# Altium footprint library Hydrolib_pcb.PcbLib: 62 footprints (part 4 of 4)
Each footprint in its own frame and in the unit in brackets; x right, y up, seen from the top. Pads: shape width x height; smd on the part's side, far side on the other; paste and mask are expansions set on the pad; w line width, h text height; cw(c..) or ccw(c..) is an arc to the next point about the centre after c.
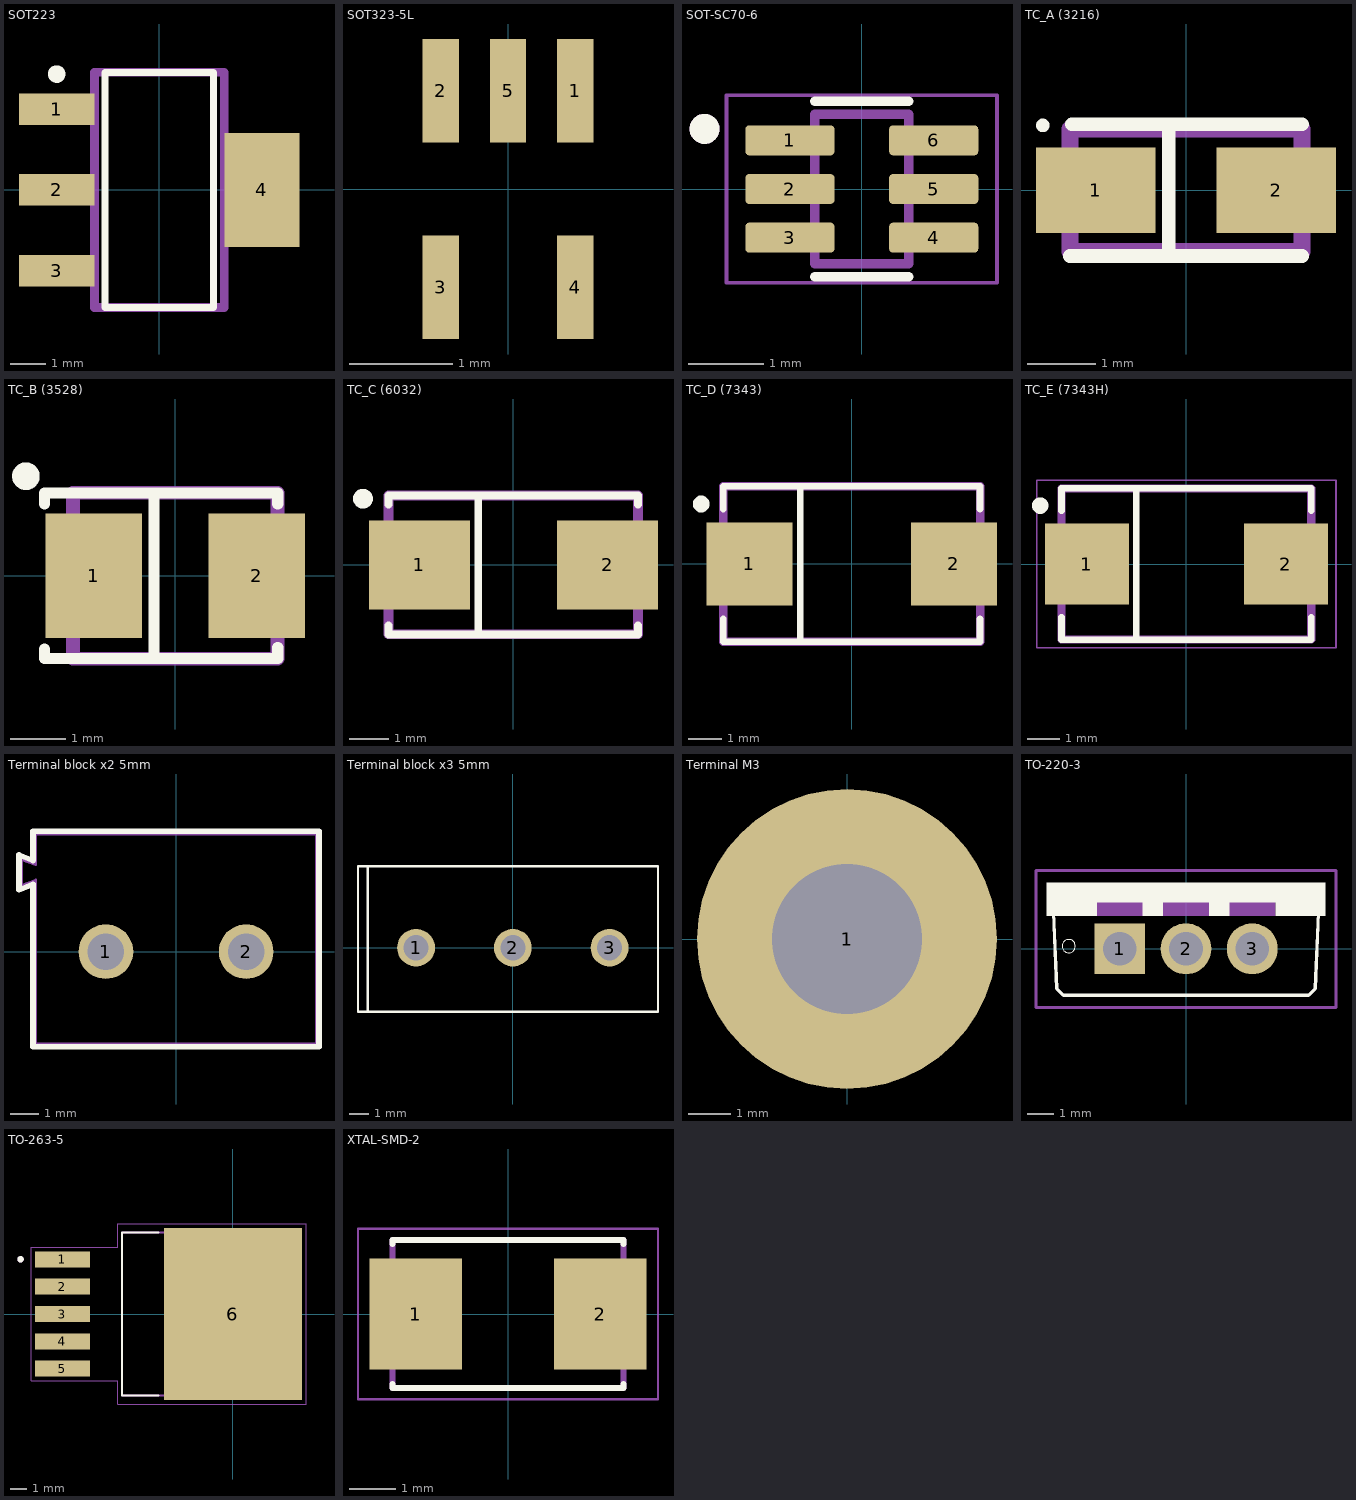
[diagram p3: the footprints below, top view; thin cyan lines are the x and y axes]

## SOT223 [mm] "SOT223, ld1117"
height 1.8
pads (4):
  rect 2.15x0.9 smd: 1(-2.925,2.3) 2(-2.925,0) 3(-2.925,-2.3)
  rect 2.15x3.25 smd: 4(2.925,0)
Top Overlay:
  circle w0.25: c-2.925,3.3 r0.125
  lines w0.2: -1.55,-3.35 -1.55,3.35 1.55,3.35 1.55,-3.35 -1.55,-3.35
Mechanical 4:
  lines w0.25: -1.85,-3.35 -1.85,3.35 1.85,3.35 1.85,-3.35 -1.85,-3.35
  text ".Designator" at 0.7,-2.9 h2.15
3D body "SOT223-3.step": height 1.6, standoff 0, extent -3.562,-3.3 3.512,3.2

## SOT323-5L [mm]
pads (5):
  rect 0.35x1 smd: 1(0.65,0.953) 2(-0.65,0.953) 3(-0.65,-0.947) 4(0.65,-0.947) 5(0,0.953)
3D body "ESDALC6V1W5.STEP": height 1.1, standoff 0, extent -1,-0.95 1,1.15

## SOT-SC70-6 [mm]
pads (6):
  rrect25% 1.19x0.4 smd: 1(-0.96,0.65) 2(-0.96,0) 3(-0.96,-0.65) 4(0.96,-0.65) 5(0.96,0) 6(0.96,0.65)
Top Overlay:
  circle w0.2: c-2.1,0.802 r0.1
  lines w0.127: -0.625,-1.17 0.625,-1.17 ; -0.625,1.17 0.625,1.17
Mechanical 13:
  circle w0.2: c-2.1,0.802 r0.1
  lines w0.127: -0.625,-1 0.625,-1 0.625,1 -0.625,1 -0.625,-1
Mechanical 15:
  lines w0.05: -1.805,-1.25 1.805,-1.25 1.805,1.25 -1.805,1.25 -1.805,-1.25
3D body "step_temp.STEP": height 1.1, standoff 0, extent -1.05,-1 1.05,1

## TC_A (3216) [mm] "Tantalum capacitor, type A,  1 pin - plus"
height 1.8
pads (2):
  rect 1.75x1.25 smd: 1(-1.325,0) 2(1.325,0)
Top Overlay:
  circle w0.1: c-2.1,0.95 r0.05
  lines w0.2: -1.702,-0.965 -0.254,-0.965 ; -1.676,0.965 -0.254,0.965 ; 1.702,-0.965 -0.254,-0.965 ; 1.702,0.965 -0.254,0.965 ; -0.254,-0.965 -0.254,0.965
Mechanical 4:
  lines w0.25: -1.7,-0.9 1.7,-0.9 1.7,0.9 -1.7,0.9 -1.7,-0.9
  text ".Designator" at 3.7,5.303 h2.15
3D body "Tant Cap SMD size A _ 3216-18.stp": height 1.64, standoff 0.01, extent -1.73,-0.8 1.73,0.8

## TC_B (3528) [mm] "Tantalum capacitor, type B, 1 pin - plus"
height 2.1
pads (2):
  rect 1.75x2.25 smd: 1(-1.475,0) 2(1.475,0)
Top Overlay:
  circle w0.25: c-2.7,1.8 r0.125
  lines w0.2: -2.362,-1.321 -2.362,-1.499 -2.361,-1.5 -0.381,-1.5 1.854,-1.5 1.854,-1.295 ; -2.361,1.295 -2.361,1.5 -0.381,1.5 ; -0.381,-1.499 -0.381,1.5 ; 1.854,1.295 1.854,1.5 -0.381,1.5
Mechanical 4:
  lines w0.25: -1.85,-1.5 1.85,-1.5 1.85,1.5 -1.85,1.5 -1.85,-1.5
  text ".Designator" at 3.4,6.203 h2.15
3D body "CAPM-TANTB-BK.stp": height 2.1, standoff 0, extent -1.85,-1.5 1.85,1.5

## TC_C (6032) [mm] "Tantalum capacitor, type C, 1 pin - plus"
height 2.8
pads (2):
  rect 2.55x2.25 smd: 1(-2.375,0) 2(2.375,0)
Top Overlay:
  circle w0.25: c-3.8,1.675 r0.125
  lines w0.2: -3.15,-1.525 -3.15,-1.75 3.15,-1.75 3.15,-1.525 ; -3.15,1.525 -3.15,1.75 3.15,1.75 3.15,1.525 ; -0.889,-1.75 -0.889,1.75
Mechanical 4:
  lines w0.25: -3.15,-1.75 3.15,-1.75 3.15,1.75 -3.15,1.75 -3.15,-1.75
  text ".Designator" at 0.9,6.303 h2.15
3D body "CAPM-TANTC-YL.stp": height 2.8, standoff 0, extent -3.1,-1.7 3.1,1.7

## TC_D (7343) [mm] "Tantalum capacitor, type D, 1 pin - plus"
height 3.1
pads (2):
  rect 2.55x2.45 smd: 1(-3.025,0) 2(3.025,0)
Top Overlay:
  circle w0.25: c-4.45,1.775 r0.125
  lines w0.2: -3.8,-1.625 -3.8,-2.3 3.8,-2.3 3.8,-1.625 ; -3.8,1.625 -3.8,2.3 3.8,2.3 3.8,1.625 ; -1.524,-2.3 -1.524,2.3
Mechanical 4:
  lines w0.25: -3.8,-2.3 -3.8,2.3 3.8,2.3 3.8,-2.3 -3.8,-2.3
  text ".Designator" at 1.3,6.903 h2.15
3D body "CAPM-TANTD-YL.stp": height 3.1, standoff 0, extent -3.75,-2.25 3.75,2.25

## TC_E (7343H) [mm] "Tantalum capacitor, type E, 1 pin - plus"
height 4.3
pads (2):
  rect 2.55x2.45 smd: 1(-3.025,0) 2(3.025,0)
Top Overlay:
  circle w0.25: c-4.45,1.775 r0.125
  lines w0.2: -3.8,-1.625 -3.8,-2.3 3.8,-2.3 3.8,-1.625 ; -3.8,1.625 -3.8,2.3 3.8,2.3 3.8,1.625 ; -1.524,-2.3 -1.524,2.3
Mechanical 4:
  lines w0.25: -3.8,-2.3 3.8,-2.3 3.8,2.3 -3.8,2.3 -3.8,-2.3
  text ".Designator" at 0.8,6.703 h2.15
Mechanical 15:
  lines w0.05: -4.55,-2.55 4.55,-2.55 4.55,2.55 -4.55,2.55 -4.55,-2.55
3D body "CAPM-TANTN-BK.stp": height 3, standoff 0, extent -3.75,-2.25 3.75,2.25

## Terminal block x2 5mm [mm]
pads (2):
  round 1.95 hole 1.3: 1(-2.5,0) 2(2.5,0)
Top Overlay:
  lines w0.2: -5.6,2.2 -5.6,3.45 -5.1,3.25 -5.1,4.3 5.1,4.3 5.1,-3.4 -5.1,-3.4 -5.1,2.4 -5.6,2.2
Mechanical 13:
  lines w0.1: -5.5,2.363 -5,2.55 -5,-3.3 5,-3.3 5,4.2 -5,4.2 -5,3.1 -5.5,3.287 -5.5,2.363
3D body "691502710002.stp": height 10.08, standoff -2.82, extent -5.5,-3.25 5,4.25

## Terminal block x3 5mm [mm]
pads (3):
  round 1.95 hole 1.3: 1(-5,0) 2(0,0) 3(5,0)
Top Overlay:
  lines w0.127: -7.5,-3.3 7.5,-3.3 7.5,4.2 -7.5,4.2 ; -7.5,-3.3 -8,-3.3 -8,4.2 -7.5,4.2 ; -7.5,-3.3 -7.5,4.2
Mechanical 13:
  text "1" at -5.507,1.502 h1.27
3D body "691502710003.stp": height 10, standoff -2.9, extent -8,-3.25 7.5,4.25

## Terminal M3 [mm]
pads (1):
  round 7 hole 3.5: 1(0,0)

## TO-220-3 [mm]
pads (3):
  rect 1.95x1.95 hole 1.3: 1(-2.54,0)
  round 1.95 hole 1.3: 2(0,0) 3(2.54,0)
Top Overlay:
  circle w0: c-4.496,0.102 r0.254
  region: 5.334,1.781 -5.344,1.781 -5.344,2.54 5.334,2.54
  region: -3.429,1.272 -5.344,1.272 -5.344,1.778 -3.429,1.778
  region: -0.889,1.272 -1.654,1.272 -1.654,1.778 -0.889,1.778
  region: 1.651,1.271 0.89,1.271 0.89,1.778 1.651,1.778
  region: 5.334,1.272 3.433,1.272 3.433,1.778 5.334,1.778
  lines w0.127: -5.08,1.397 -4.953,-1.524 -4.699,-1.778 4.699,-1.778 4.953,-1.524 5.08,1.397
Mechanical 13:
  region: -1.651,1.271 -3.432,1.271 -3.432,1.778 -1.651,1.778
  region: 0.889,1.271 -0.889,1.271 -0.889,1.778 0.889,1.778
  region: 3.429,1.272 1.653,1.272 1.653,1.778 3.429,1.778
Mechanical 15:
  lines w0.127: -5.75,-2.25 5.75,-2.25 5.75,3 -5.75,3 -5.75,-2.25
3D body "IRF520NPBF.STEP": height 19.3, standoff -10.03, extent -5.207,-1.473 5.207,2.972

## TO-263-5 [mm]
pads (6):
  rect 3.4x1 smd paste-0.05 mask+0.07: 1(-10.6,3.4) 2(-10.6,1.7) 3(-10.6,0) 4(-10.6,-1.7) 5(-10.6,-3.4)
  rect 8.6x10.7 smd paste-0.05 mask+0.07: 6(0,0)
Top Overlay:
  circle w0.2: c-13.2,3.4 r0.1
  lines w0.127: -4.62,-5.08 -6.905,-5.08 -6.905,5.08 -4.62,5.08
Mechanical 13:
  circle w0.2: c-13.2,3.4 r0.1
  lines w0.127: -6.905,-5.08 2.02,-5.08 2.02,5.08 -6.905,5.08 -6.905,-5.08
Mechanical 15:
  lines w0.05: -12.55,-4.15 -12.55,4.15 -7.155,4.15 -7.155,5.6 4.55,5.6 4.55,-5.6 -7.155,-5.6 -7.155,-4.15 -12.55,-4.15
3D body "step_temp.STEP": height 4.65, standoff -0.15, extent -10.976,-5.08 3.375,5.08

## XTAL-SMD-2 [mm]
height 1.5
pads (2):
  rect 2x2.4 smd: 1(-2,0) 2(2,0)
Top Overlay:
  lines w0.127: -2.5,-1.52 -2.5,-1.6 2.5,-1.6 2.5,-1.52 ; -2.5,1.52 -2.5,1.6 2.5,1.6 2.5,1.52
Mechanical 13:
  lines w0.127: -2.5,-1.6 2.5,-1.6 2.5,1.6 -2.5,1.6 -2.5,-1.6
Mechanical 15:
  lines w0.05: -3.25,-1.85 3.25,-1.85 3.25,1.85 -3.25,1.85 -3.25,-1.85
3D body "step_temp.STEP": height 1.5, standoff 0, extent -2.5,-1.6 2.5,1.6